# Altium schematic symbol library RPR-220.SchLib: 1 symbol
Pins are listed as number, name and electrical type; pins without a type are passive.

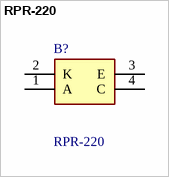
[diagram p0: symbol RPR-220]

## RPR-220
designator B?
PHOTOINTERRUPTER REFL 6MM 800NM Reflective Optical Sensor 0.236" (6mm) Radial - 4 Leads; Manufacturer_Name: ROHM Semiconductor; Geometry.Height: 6.7mm; Manufacturer_Part_Number: RPR-220; Mouser Part Number: 755-RPR-220; Mouser Price/Stock: https://www.mouser.co.uk/ProductDetail/ROHM-Semiconductor/RPR-220?qs=4kLU8WoGk0tYWaIenvZlYw%3D%3D; Arrow Part Number: RPR-220; Arrow Price/Stock: https://www.arrow.com/en/products/rpr-220/rohm-semiconductor.html?utm_currency=USD&region=asia; Datasheet Link: https://fscdn.rohm.com/en/products/databook/datasheet/opto/optical_sensor/photosensor/rpr-220.pdf
footprint RPR220
pins: 1 A, 2 K, 3 E, 4 C